# Altium schematic symbol library PTS526SM15SMTR2LFS.SchLib: 1 symbol
Pins are listed as number, name and electrical type; pins without a type are passive.

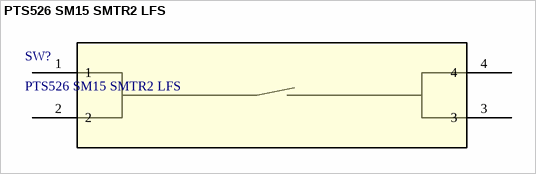
[diagram p0: symbol PTS526 SM15 SMTR2 LFS]

## PTS526 SM15 SMTR2 LFS
designator SW?
Description; Manufacturer_Name: C&K Components; Copyright: Copyright (C) 2026 Ultra Librarian. All rights reserved.; Manufacturer_Part_Number: PTS526 SM15 SMTR2 LFS; RefDes: RefDes; Type: Type
footprint SON4_PTS526 SM15 SMTR2 LFS_CNK
pins: 1, 2, 3, 4